# Altium footprint library BT_PDB_Lib.PcbLib: 13 footprints
Each footprint in its own frame and in the unit in brackets; x right, y up, seen from the top. Pads: shape width x height; smd on the part's side, far side on the other; paste and mask are expansions set on the pad; w line width, h text height; cw(c..) or ccw(c..) is an arc to the next point about the centre after c.
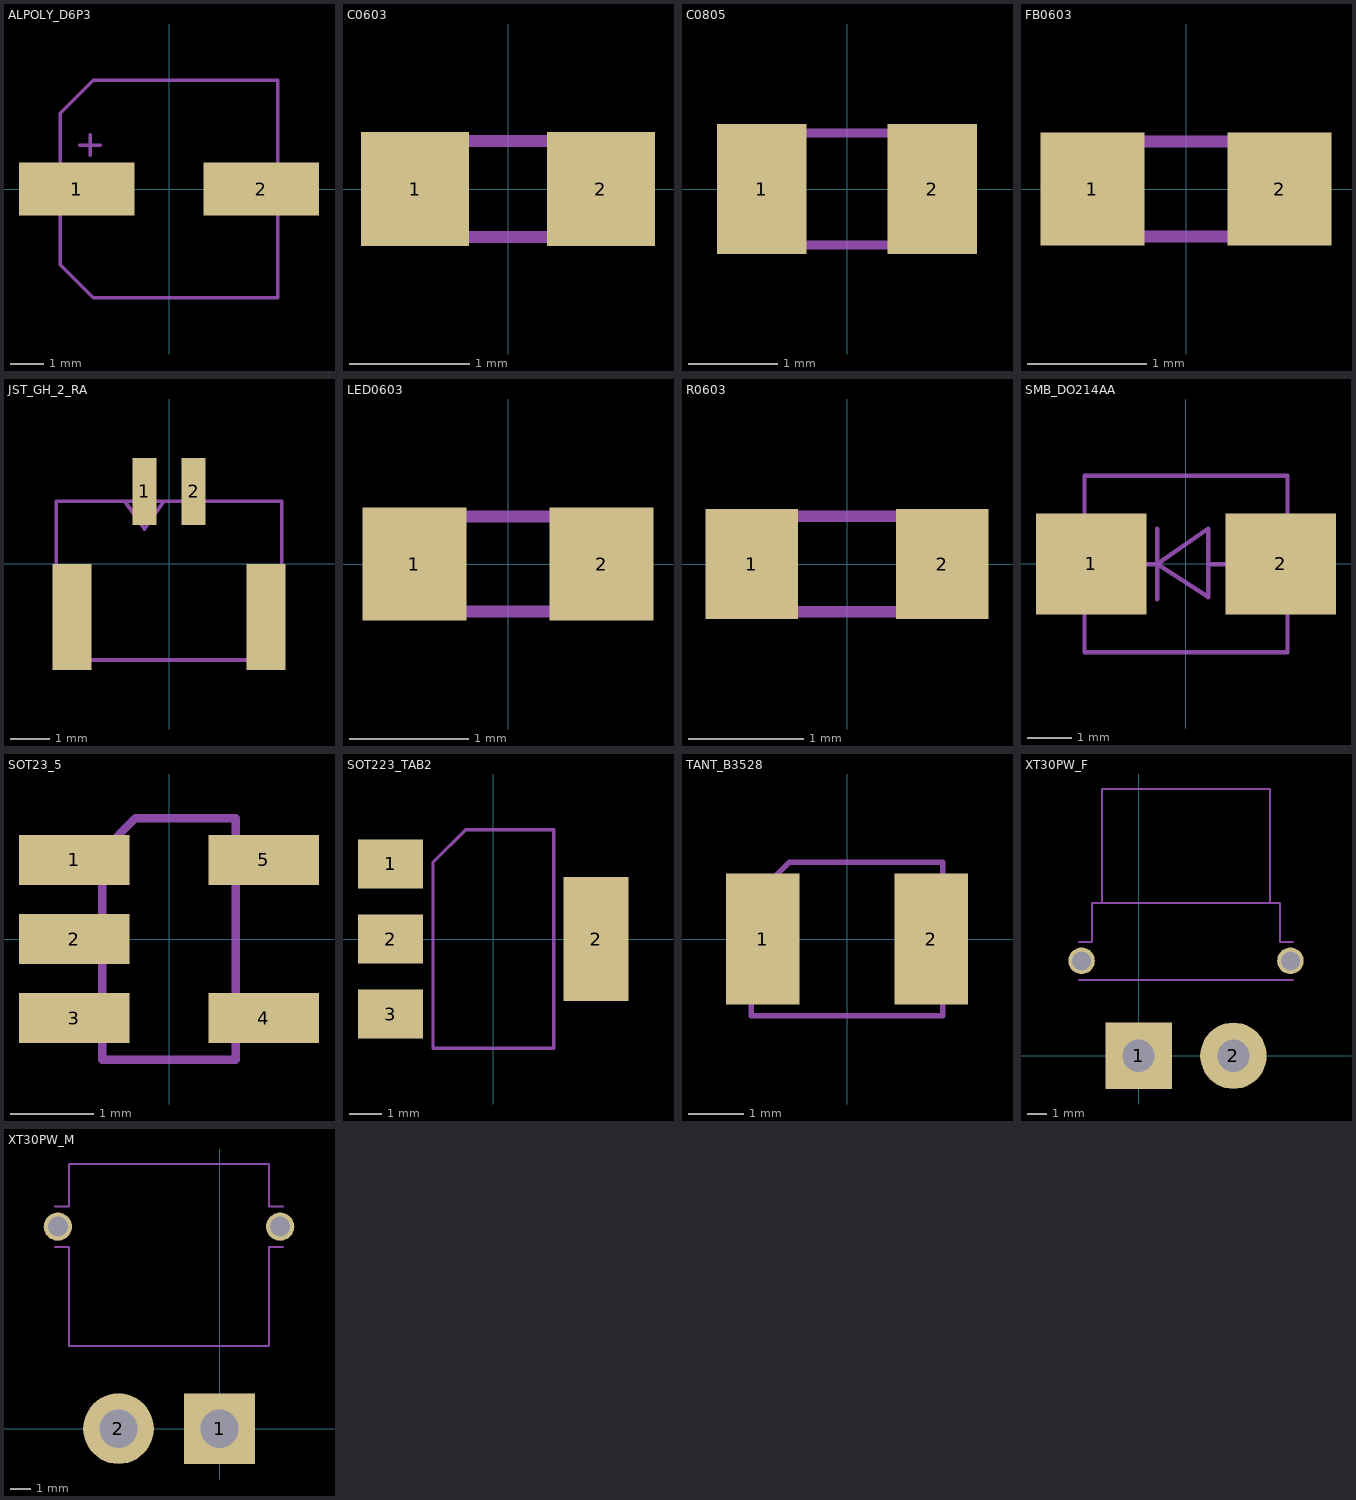
[diagram p0: the footprints below, top view; thin cyan lines are the x and y axes]

## ALPOLY_D6P3 [mm] "ALPOLY_D6P3"
height 5.9
pads (2):
  rect 3.5x1.6 smd: 1(-2.8,0) 2(2.8,0)
Mechanical 13:
  lines w0.1: -2.705,1.33 -2.075,1.33 ; -2.39,1.015 -2.39,1.645 ; -3.3,-2.3 -3.3,2.3 -2.3,3.3 3.3,3.3 3.3,-3.3 -2.3,-3.3 -3.3,-2.3

## C0603 [mm] "C0603"
height 0.9
pads (2):
  rect 0.9x0.95 smd: 1(-0.775,0) 2(0.775,0)
Mechanical 13:
  lines w0.1: -0.8,-0.4 -0.8,0.4 0.8,0.4 0.8,-0.4 -0.8,-0.4

## C0805 [mm] "C0805"
height 0.9
pads (2):
  rect 1x1.45 smd: 1(-0.95,0) 2(0.95,0)
Mechanical 13:
  lines w0.1: -1,-0.625 -1,0.625 1,0.625 1,-0.625 -1,-0.625

## FB0603 [mm] "FB0603"
height 0.9
pads (2):
  rect 0.875x0.95 smd: 1(-0.787,0) 2(0.787,0)
Mechanical 13:
  lines w0.1: -0.8,-0.4 -0.8,0.4 0.8,0.4 0.8,-0.4 -0.8,-0.4

## JST_GH_2_RA [mm] "JST_GH_2_RA"
height 4.1
pads (4):
  rect 0.6x1.7 smd: 1(-0.625,1.85) 2(0.625,1.85)
  rect 1x2.7 smd: ""(-2.475,-1.35) ""(2.475,-1.35)
Mechanical 13:
  lines w0.1: -1.125,1.6 -0.625,0.893 -0.125,1.6 ; -2.875,-2.45 -2.875,1.6 2.875,1.6 2.875,-2.45 -2.875,-2.45

## LED0603 [mm] "LED0603"
height 0.9
pads (2):
  rect 0.875x0.95 smd: 1(-0.787,0) 2(0.787,0)
Mechanical 13:
  lines w0.1: -0.8,-0.4 -0.8,0.1 -0.5,0.4 0.8,0.4 0.8,-0.4 -0.8,-0.4

## R0603 [mm] "R0603"
height 0.9
pads (2):
  rect 0.8x0.95 smd: 1(-0.825,0) 2(0.825,0)
Mechanical 13:
  lines w0.1: -0.8,-0.413 -0.8,0.413 0.8,0.413 0.8,-0.413 -0.8,-0.413

## SMB_DO214AA [mm] "SMB_DO214AA"
height 2.4
pads (2):
  rect 2.5x2.3 smd: 1(-2.15,0) 2(2.15,0)
Mechanical 13:
  lines w0.1: -1.551,-0.001 -0.649,-0.001 ; -0.649,-0.801 -0.649,0.799 ; 0.501,-0.001 1.499,-0.001 ; -0.649,-0.001 0.501,0.799 0.501,-0.75 -0.649,-0.001 ; -2.3,-2 -2.3,2 2.3,2 2.3,-2 -2.3,-2

## SOT23_5 [mm] "SOT23_5"
height 1.45
pads (5):
  rect 1.325x0.6 smd: 1(-1.138,0.95) 2(-1.138,0) 3(-1.138,-0.95) 4(1.138,-0.95) 5(1.138,0.95)
Mechanical 13:
  lines w0.1: -0.8,-1.45 -0.8,1.05 -0.4,1.45 0.8,1.45 0.8,-1.45 -0.8,-1.45

## SOT223_TAB2 [mm] "SOT223_TAB2"
height 1.8
pads (4):
  rect 2x1.5 smd: 1(-3.15,2.3) 2(-3.15,0) 3(-3.15,-2.3)
  rect 2x3.8 smd: 2(3.15,0)
Mechanical 13:
  lines w0.1: -1.85,-3.35 -1.85,2.35 -0.85,3.35 1.85,3.35 1.85,-3.35 -1.85,-3.35

## TANT_B3528 [mm] "TANT_B3528"
height 2.1
pads (2):
  rect 1.34x2.39 smd: 1(-1.54,0) 2(1.54,0)
Mechanical 13:
  lines w0.1: -1.75,-1.4 -1.75,0.7 -1.05,1.4 1.75,1.4 1.75,-1.4 -1.75,-1.4

## XT30PW_F [mm] "XT30PW_F"
height 5.2
pads (4):
  rect 3.5x3.5 hole 1.7: 1(0,0)
  round 3.5 hole 1.7: 2(5,0)
  round 1.4 hole 1: ""(-3,5) ""(8,5)
Mechanical 13:
  lines w0.1: -3.15,4 8.15,4 ; -3.15,6 -2.45,6 -2.45,8.05 7.45,8.05 7.45,6.05 ; -1.92,8.05 -1.92,14.05 6.92,14.05 6.92,8.05 ; 7.45,6 8.15,6

## XT30PW_M [mm] "XT30PW_M"
height 5.2
pads (4):
  rect 3.5x3.5 hole 1.9: 1(0,0)
  round 3.5 hole 1.9: 2(-5,0)
  round 1.4 hole 1: ""(-8,10) ""(3,10)
Mechanical 13:
  lines w0.1: -8.15,9 -7.45,9 -7.45,4.1 2.45,4.1 2.45,9 3.15,9 ; -8.15,11 -7.45,11 -7.45,13.1 2.45,13.1 2.45,11 3.15,11